# Altium schematic symbol library test_point.SchLib: 1 symbol
Pins are listed as number, name and electrical type; pins without a type are passive.

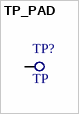
[diagram p0: symbol TP_PAD]

## TP_PAD
designator TP?, comment TP
Test pad 1.5 mm; Value: TP; Manufacturer: -; MPN: -; LCSC: -; JLCPCB Type: - (copper pad, no part); Datasheet: -
footprint TP_PAD_D1.5
pins: 1